# Altium footprint library PcbLib1.PcbLib: 9 footprints
Each footprint in its own frame and in the unit in brackets; x right, y up, seen from the top. Pads: shape width x height; smd on the part's side, far side on the other; paste and mask are expansions set on the pad; w line width, h text height; cw(c..) or ccw(c..) is an arc to the next point about the centre after c.
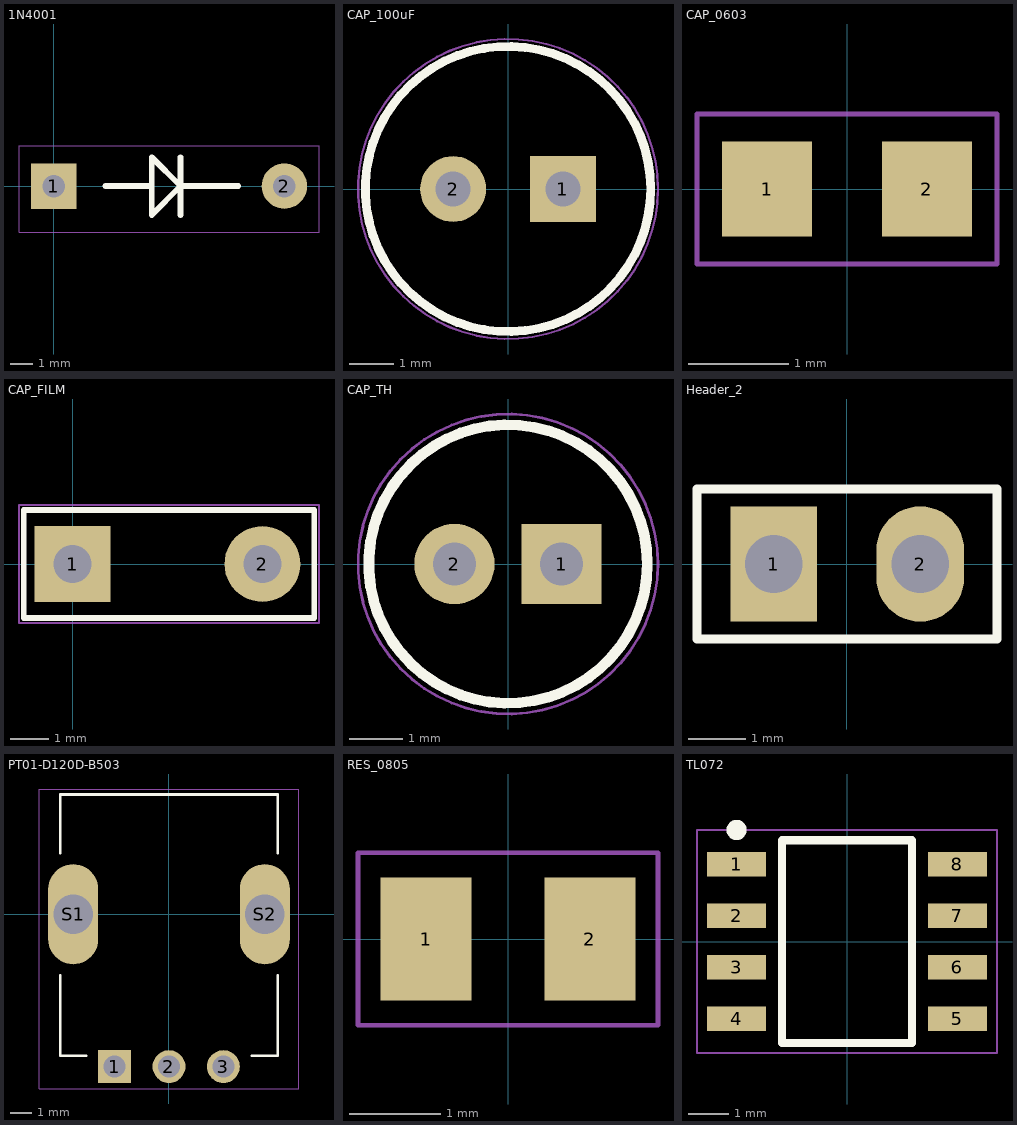
[diagram p0: the footprints below, top view; thin cyan lines are the x and y axes]

## 1N4001 [mm]
pads (2):
  rect 2x2 hole 1: 1(0,0)
  round 2 hole 1: 2(10.16,0)
Top Overlay:
  lines w0.254: 2.286,0 4.318,0 ; 5.588,-1.27 5.588,1.27 ; 8.128,0 5.588,0 ; 4.318,0 4.318,-1.27 5.588,0 ; 4.318,0 4.318,1.27 5.588,0
Mechanical 15:
  lines w0.05: -1.524,-2.032 11.684,-2.032 11.684,1.778 -1.524,1.778 -1.524,-2.032
3D body "1N4001-T.step": height 2.78, standoff -21.67, extent -0.279,-1.346 10.668,1.346

## CAP_100uF [mm]
pads (2):
  rect 1.5x1.5 hole 0.8: 1(1.25,0)
  round 1.5 hole 0.8: 2(-1.25,0)
Top Overlay:
  circle w0.2: c0,0 r3.25
Mechanical 15:
  circle w0.05: c0,0 r3.417
3D body "Download_STP_860020x730xx+%28rev1%29.stp": height 11.04, standoff -19.96, extent -3.144,-3.138 3.14,3.15

## CAP_0603 [mm]
pads (2):
  rect 0.9x0.95 smd: 1(-0.8,0) 2(0.8,0)
Mechanical 15:
  lines w0.05: -1.5,-0.75 1.5,-0.75 1.5,0.75 -1.5,0.75 -1.5,-0.75
3D body "CAPC1608X06N.step": height 0.55, standoff 0, extent -0.85,-0.45 0.85,0.45

## CAP_FILM [mm]
pads (2):
  rect 2x2 hole 1: 1(0,0)
  round 2 hole 1: 2(5,0)
Top Overlay:
  lines w0.152: -1.283,-1.422 -1.283,1.422 6.363,1.422 6.363,-1.422 -1.283,-1.422
Mechanical 15:
  lines w0.05: -1.41,-1.549 -1.41,1.549 6.49,1.549 6.49,-1.549 -1.41,-1.549
3D body "CFR_RB3_7.2X6.5X2.5_L7.4H6.6T2.6S5LL5.5F0.55.step": height 6.6, standoff -5.5, extent -1.2,-1.3 6.2,1.305

## CAP_TH [mm]
pads (2):
  rect 1.5x1.5 hole 0.8: 1(1,0)
  round 1.5 hole 0.8: 2(-1,0)
Top Overlay:
  circle w0.2: c0,0 r2.6
Mechanical 15:
  circle w0.05: c0,0 r2.8
3D body "Download_STP_860020x720xx+%28rev1%29.stp": height 11.04, standoff -19.96, extent -2.5,-2.499 2.49,2.5

## Header_2 [mm]
pads (2):
  rect 1.5x2 hole 1: 1(-1.27,0)
  oval 1.524x2 hole 1: 2(1.27,0)
Top Overlay:
  lines w0.15: -2.6,-1.3 -2.6,1.3 2.6,1.3 2.6,-1.3 -2.6,-1.3
Mechanical 15:
  lines w0.05: -2.6,-1.3 -2.6,1.3 2.6,1.3 2.6,-1.3 -2.6,-1.3
3D body "Header2.step": height 8.54, standoff -3, extent -2.54,-1.27 2.54,1.27

## PT01-D120D-B503 [mm]
pads (5):
  rect 1.508x1.508 hole 1: 1(-2.5,-7)
  round 1.508 hole 1: 2(0,-7) 3(2.5,-7)
  oval 2.3x4.6 hole 1.8 square: S1(-4.4,0) S2(4.4,0)
Top Overlay:
  lines w0.127: -5,-2.8 -5,-6.5 -3.8,-6.5 ; -5,2.8 -5,5.5 5,5.5 5,2.8 ; 3.8,-6.5 5,-6.5 5,-2.8
Mechanical 15:
  lines w0.05: -5.95,-8.03 5.95,-8.03 5.95,5.75 -5.95,5.75 -5.95,-8.03
3D body "PT01-D115D-B503.STEP": height 15.1, standoff -4.65, extent -5.636,-7.208 5.636,5.442

## RES_0805 [mm] "Chip Resistor, 2-Leads, Body 2.00x1.25mm, IPC Medium Density"
height 0.6
pads (2):
  rect 1x1.35 smd: 1(-0.9,0) 2(0.9,0)
Mechanical 15:
  lines w0.05: -1.65,-0.95 -1.65,0.95 1.65,0.95 1.65,-0.95 -1.65,-0.95
3D body "RESC2012X06N.step": height 0.6, standoff 0, extent -1.05,-0.675 1.05,0.675

## TL072 [mm] "SOIC, 8-Leads, Body 4.91x3.90mm, Pitch 1.27mm, IPC Medium Density"
height 1.75
pads (8):
  rect 1.45x0.6 smd: 1(-2.725,1.905) 2(-2.725,0.635) 3(-2.725,-0.635) 4(-2.725,-1.905) 5(2.725,-1.905) 6(2.725,-0.635) 7(2.725,0.635) 8(2.725,1.905)
Top Overlay:
  circle w0.25: c-2.725,2.755 r0.125
  lines w0.2: -1.6,-2.5 1.6,-2.5 1.6,2.5 -1.6,2.5 -1.6,-2.5
Mechanical 15:
  lines w0.05: -3.7,-2.75 3.7,-2.75 3.7,2.75 -3.7,2.75 -3.7,-2.75
3D body "SOIC127P600X175-8N.step": height 1.75, standoff 0, extent -2.997,-2.5 2.997,2.5